# Altium footprint library laboE_altium.PcbLib: 676 footprints (part 24 of 43)
Each footprint in its own frame and in the unit in brackets; x right, y up, seen from the top. Pads: shape width x height; smd on the part's side, far side on the other; paste and mask are expansions set on the pad; w line width, h text height; cw(c..) or ccw(c..) is an arc to the next point about the centre after c.
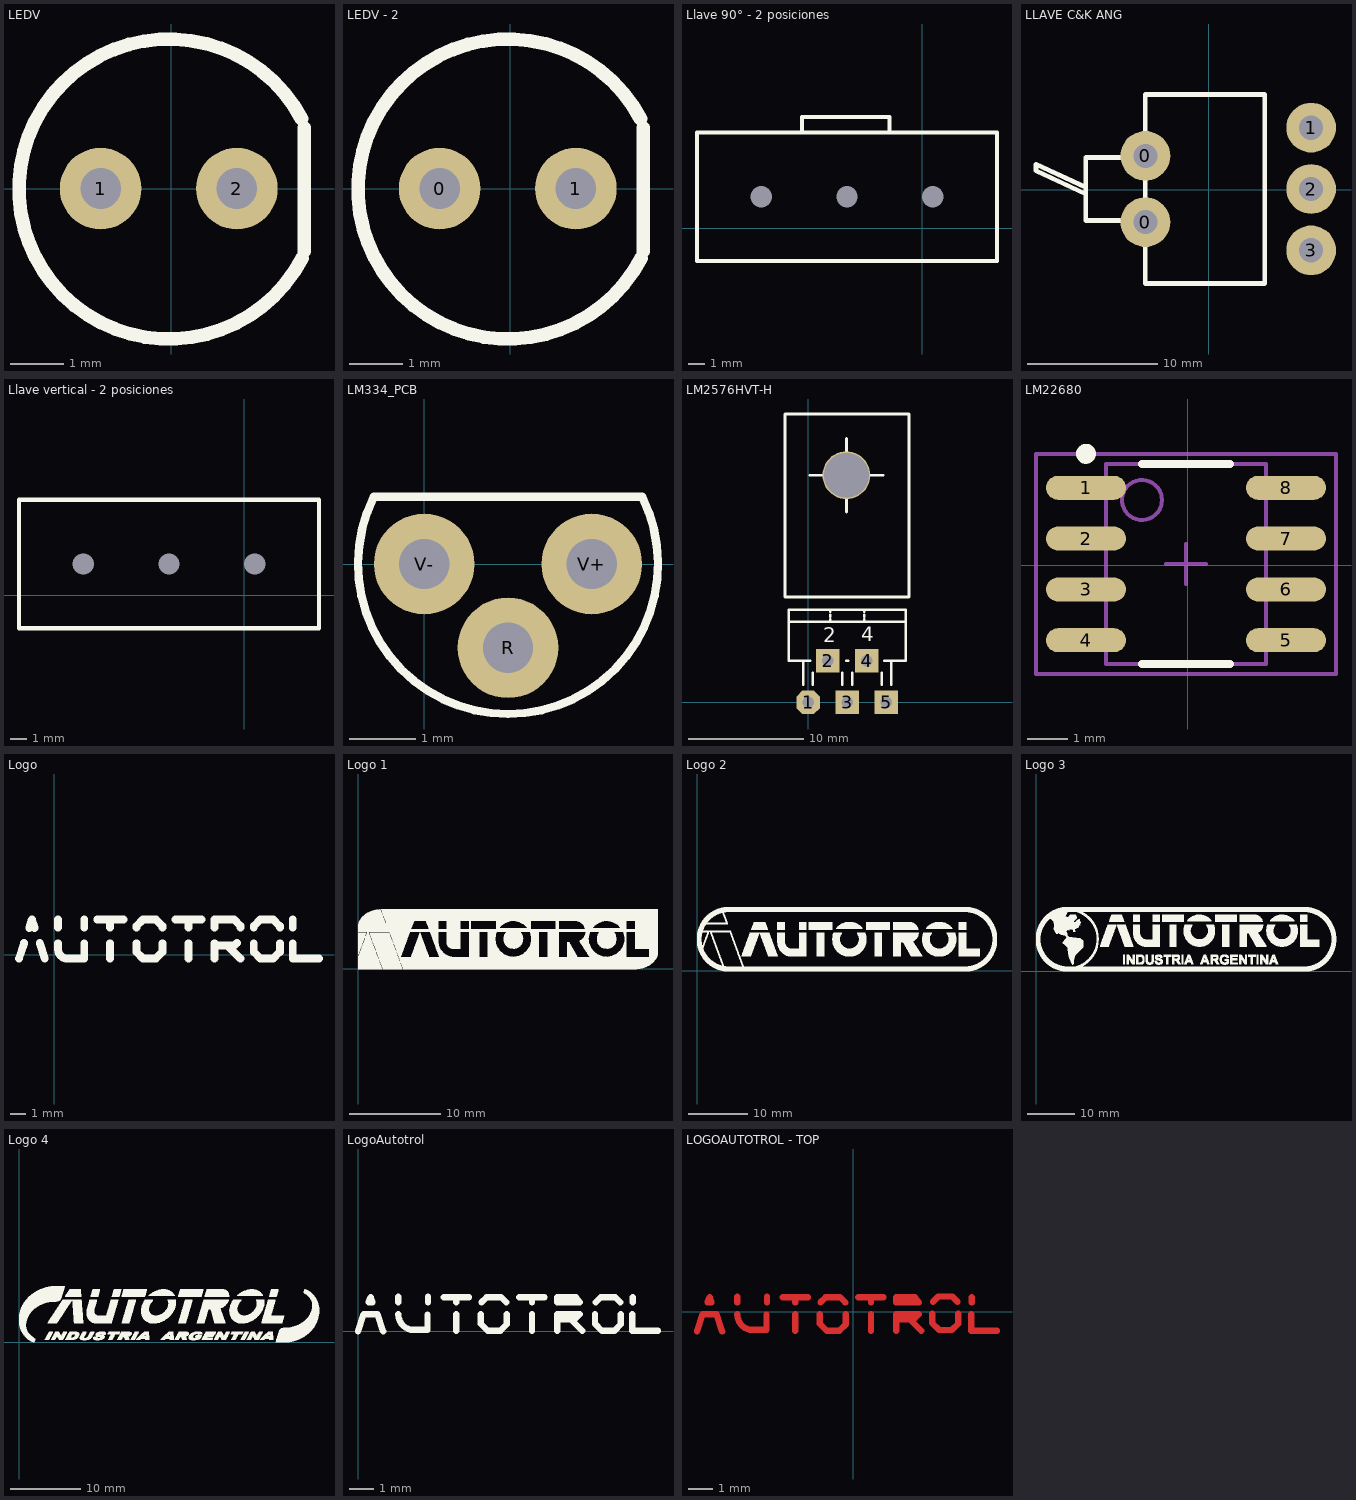
[diagram p23: the footprints below, top view; thin cyan lines are the x and y axes]

## LEDV [mil]
pads (2):
  round 60 hole 30: 1(-52,0) 2(48,0)
Top Overlay:
  lines w10: 95.55,51.35 ccw(c-1.81,-0.26) 95.86,-51.27 ; 97.67,-45.96 97.67,44.8
3D body: height 157.48, standoff 78.74, extent -113,-112 94.61,109
3D body: height 236.22, standoff 39.37, extent -102.34,-100.41 94.42,96.4
3D body: height 78.74, standoff 0, extent -75.62,-23.62 -28.37,23.63
3D body: height 78.74, standoff 0, extent 24.88,-24.12 72.12,23.12

## LEDV - 2 [mil]
pads (2):
  round 60 hole 30: 0(-52,0) 1(48,0)
Top Overlay:
  lines w10: 95.55,51.35 ccw(c-1.81,-0.26) 95.86,-51.27 ; 97.67,-45.96 97.67,44.8
3D body: height 157.48, standoff 78.74, extent -113,-112 94.61,109
3D body: height 236.22, standoff 39.37, extent -102.34,-100.41 94.42,96.4
3D body: height 78.74, standoff 0, extent -75.62,-23.62 -28.37,23.63
3D body: height 78.74, standoff 0, extent 24.88,-24.12 72.12,23.12

## Llave 90° - 2 posiciones [mil]
pads (3):
  oct 0x0 / inner round 0 / far side oct 110x110 hole 50: 1(-376,73)
  round 0 / inner round 0 / far side round 110 hole 50: 2(-176,73) 3(24,73)
Top Overlay:
  lines w10: -281,223 -281,259 -77,259 -77,223 ; -526,-77 -526,223 174,223 174,-77 -526,-77
3D body: height 472.44, standoff 0, extent -523,-78 174,224
3D body: height 354.33, standoff 118.11, extent -495,257 134,382
3D body: height 314.96, standoff 157.48, extent -282,224 -76,257

## LLAVE C&K ANG [mil]
pads (5):
  round 150 hole 73: 0(-190.78,-97.98) 0(-190.78,102.02) 1(309.22,187.02) 2(309.22,2.02) 3(309.22,-182.98)
Top Overlay:
  lines w14: -370.78,-12.98 -520.78,57.02 -520.78,77.02 -370.78,7.02 ; -190.78,-92.98 -370.78,-92.98 -370.78,97.02 -190.78,97.02 ; -190.78,-282.98 -190.78,287.02 169.22,287.02 169.22,-282.98 -190.78,-282.98
3D body: height 39.37, standoff -39.37, extent -210.42,82.49 -171.13,121.71
3D body: height 39.37, standoff -39.37, extent -210.42,-117.51 -171.13,-78.29
3D body: height 139.61, standoff 100.39, extent 151.74,167.37 309.22,206.66
3D body: height 139.61, standoff 100.39, extent 151.74,-17.63 309.22,21.66
3D body: height 139.61, standoff 100.39, extent 151.74,-202.63 309.22,-163.34
3D body: height 137.8, standoff -39.37, extent 289.58,167.49 328.87,206.71
3D body: height 137.8, standoff -39.37, extent 289.57,-17.51 328.86,21.71
3D body: height 137.8, standoff -39.37, extent 289.58,-202.51 328.87,-163.29
3D body: height 166.95, standoff 72.83, extent -578.89,-105.58 -176.68,117.69
3D body: height 275.59, standoff 7.87, extent -197.67,-193.34 -189.8,196.43
3D body: height 19.68, standoff 0, extent -197.67,-193.34 129.1,196.43
3D body: height 279.53, standoff 267.72, extent -197.67,-193.34 129.1,196.43
3D body: height 239.21, standoff 0, extent -372.87,-119.52 -18.54,120.17
3D body: height 275.59, standoff 7.87, extent -185.86,-283.89 168.47,288.94

## Llave vertical - 2 posiciones [mil]
pads (3):
  oct 0x0 / inner round 0 / far side oct 110x110 hole 50: 1(-376,73)
  round 0 / inner round 0 / far side round 110 hole 50: 2(-176,73) 3(24,73)
Top Overlay:
  lines w10: -526,-77 174,-77 174,223 -526,223 -526,-77
3D body: height 1176.95, standoff 642.36, extent -249.41,-5.58 73.04,151.59
3D body: height 787.4, standoff 393.7, extent -324.42,-76.3 -26.39,222.32
3D body: height 472.44, standoff 0, extent -523,-78 174,224

## LM334_PCB [mil]
pads (3):
  round 60 / inner round 0 / far side round 60 hole 30 paste+0: R(50,-50) V+(100,0) V-(0,0)
Top Overlay:
  lines w5: -30,40 ccw(c50,0) 130,40 -30,40

## LM2576HVT-H [mil]
pads (6):
  oct 80x80 hole 40: 1(0,0)
  rect 80x80 hole 40: 2(66.67,141.67) 3(133.33,0) 4(200,141.67) 5(266.67,0)
  round 163 hole 153: ""(130.33,775.83)
Top Overlay:
  lines w7.87: -66.67,275 333.33,275 ; -16.67,59.05 -16.67,141.67 ; 7.87,141.67 -66.67,141.67 -66.67,316.67 333.33,316.67 333.33,141.67 258.79,141.67 ; 15.75,59.05 15.75,101.5 ; 75,275 75,283.33 ; 75,291.67 75,300 ; 75,308.33 75,316.67 ; 116.67,59.05 116.67,101.5 ; 129.4,141.67 137.27,141.67 ; 150,59.05 150,101.5 ; 191.67,275 191.67,283.33 ; 191.67,291.67 191.67,300 ; 191.67,308.33 191.67,316.67 ; 251.21,59.05 251.21,101.5 ; 283.33,59.05 283.33,141.67
  lines w10: 5.33,775.83 55.33,775.83 ; 130.33,650.83 130.33,700.83 ; 130.33,850.83 130.33,900.83 ; 205.33,775.83 255.33,775.83 ; -80,360 345,360 345,985 -80,985 -80,360
  text "2" at 51.22,205.36 h50
  text "4" at 180.98,208.71 h50

## LM22680 [mm]
pads (8):
  oval 2x0.6 smd: 1(-2.546,1.935) 2(-2.546,0.665) 3(-2.546,-0.605) 4(-2.546,-1.875) 5(2.454,-1.875) 6(2.454,-0.605) 7(2.454,0.665) 8(2.454,1.935)
Top Overlay:
  circle w0.25: c-2.546,2.785 r0.125
  lines w0.2: -1.146,-2.47 1.054,-2.47 ; -1.146,2.53 1.054,2.53
Mechanical 13:
  circle w0.1: c-1.146,1.63 r0.5
  lines w0.1: -2.046,-2.47 -2.046,2.53 1.954,2.53 1.954,-2.47 -2.046,-2.47
Mechanical 15:
  lines w0.1: -0.546,0.03 0.454,0.03 ; -0.046,-0.47 -0.046,0.53 ; -3.796,-2.72 -3.796,2.78 3.704,2.78 3.704,-2.72 -3.796,-2.72
3D body: height 1.68, standoff 0.03, extent -2.046,-2.47 1.954,2.53

## Logo [mm]
Top Overlay:
  lines w0.508: -2.29,-0.25 -1.96,0.766 ; -1.63,1.731 -1.452,2.29 -1.274,1.731 ; -0.944,0.766 -0.614,-0.25 ; 0.25,0.334 0.25,0.741 ; 0.25,1.757 0.25,2.29 ; 0.259,0.359 ccw(c0.834,0.326) 0.834,-0.25 1.952,-0.25 1.952,0.741 ; 1.952,1.757 1.952,2.29 ; 2.79,2.29 4.492,2.29 ; 3.628,-0.25 3.628,0.741 ; 3.628,1.757 3.628,2.29 ; 5.33,0.182 5.762,-0.25 ; 5.33,0.207 5.33,0.741 ; 5.33,1.757 5.33,1.833 ; 5.33,1.858 5.762,2.29 6.575,2.29 ; 5.787,-0.25 6.6,-0.25 7.032,0.182 ; 6.6,2.29 7.032,1.858 ; 7.032,0.207 7.032,0.741 ; 7.032,1.757 7.032,1.833 ; 7.87,2.29 9.572,2.29 ; 8.708,-0.25 8.708,0.741 ; 8.708,1.757 8.708,2.29 ; 10.41,-0.25 10.41,0.741 ; 10.41,0.588 11.68,0.588 11.858,0.766 ; 10.41,1.757 10.41,2.29 11.68,2.29 12.086,1.884 12.086,1.757 ; 11.274,0.563 12.086,-0.25 ; 12.95,0.182 13.382,-0.25 ; 12.95,0.207 12.95,0.741 ; 12.95,1.757 12.95,1.833 ; 12.95,1.858 13.382,2.29 14.195,2.29 ; 13.407,-0.25 14.22,-0.25 14.652,0.182 ; 14.22,2.29 14.652,1.858 ; 14.652,0.207 14.652,0.741 ; 14.652,1.757 14.652,1.833 ; 15.49,0.741 15.49,-0.25 17.192,-0.25 ; 15.49,1.757 15.49,2.29

## Logo 1 [mm]
Top Overlay:
  drawing of 2301 lines, arcs and shapes, not listed

## Logo 2 [mm]
Top Overlay:
  drawing of 3637 lines, arcs and shapes, not listed

## Logo 3 [mm]
Top Overlay:
  drawing of 6632 lines, arcs and shapes, not listed

## Logo 4 [mm]
Top Overlay:
  drawing of 3600 lines, arcs and shapes, not listed

## LOGO_AUTO [mm]
height 1
Top Overlay:
  lines w0.508: 0,0 0.33,1.016 ; 0.66,1.981 0.838,2.54 1.016,1.981 ; 1.346,1.016 1.676,0 ; 2.54,0.584 2.54,0.991 ; 2.54,2.007 2.54,2.54 ; 2.549,0.609 ccw(c3.124,0.576) 3.124,0 4.242,0 4.242,0.991 ; 4.242,2.007 4.242,2.54 ; 5.08,2.54 6.782,2.54 ; 5.918,0 5.918,0.991 ; 5.918,2.007 5.918,2.54 ; 7.62,0.432 8.052,0 ; 7.62,0.457 7.62,0.991 ; 7.62,2.007 7.62,2.083 ; 7.62,2.108 8.052,2.54 8.865,2.54 ; 8.077,0 8.89,0 9.322,0.432 ; 8.89,2.54 9.322,2.108 ; 9.322,0.457 9.322,0.991 ; 9.322,2.007 9.322,2.083 ; 10.16,2.54 11.862,2.54 ; 10.998,0 10.998,0.991 ; 10.998,2.007 10.998,2.54 ; 12.7,0 12.7,0.991 ; 12.7,0.838 13.97,0.838 14.148,1.016 ; 12.7,2.007 12.7,2.54 13.97,2.54 14.376,2.134 14.376,2.007 ; 13.564,0.813 14.376,0 ; 15.24,0.432 15.672,0 ; 15.24,0.457 15.24,0.991 ; 15.24,2.007 15.24,2.083 ; 15.24,2.108 15.672,2.54 16.485,2.54 ; 15.697,0 16.51,0 16.942,0.432 ; 16.51,2.54 16.942,2.108 ; 16.942,0.457 16.942,0.991 ; 16.942,2.007 16.942,2.083 ; 17.78,0.991 17.78,0 19.482,0 ; 17.78,2.007 17.78,2.54 ; 2183.976,2674.027 2184.306,2675.043 ; 2184.636,2676.008 2184.814,2676.567 2184.992,2676.008 ; 2185.322,2675.043 2185.652,2674.027 ; 2186.516,2674.611 2186.516,2675.018 ; 2186.516,2676.034 2186.516,2676.567 ; 2186.525,2674.636 ccw(c2187.1,2674.603) 2187.1,2674.027 2188.218,2674.027 2188.218,2675.018 ; 2188.218,2676.034 2188.218,2676.567 ; 2189.056,2676.567 2190.758,2676.567 ; 2189.894,2674.027 2189.894,2675.018 ; 2189.894,2676.034 2189.894,2676.567 ; 2191.596,2674.459 2192.028,2674.027 ; 2191.596,2674.484 2191.596,2675.018 ; 2191.596,2676.034 2191.596,2676.11 ; 2191.596,2676.135 2192.028,2676.567 2192.841,2676.567 ; 2192.053,2674.027 2192.866,2674.027 2193.298,2674.459 ; 2192.866,2676.567 2193.298,2676.135 ; 2193.298,2674.484 2193.298,2675.018 ; 2193.298,2676.034 2193.298,2676.11 ; 2194.136,2676.567 2195.838,2676.567 ; 2194.974,2674.027 2194.974,2675.018 ; 2194.974,2676.034 2194.974,2676.567 ; 2196.676,2674.027 2196.676,2675.018 ; 2196.676,2674.865 2197.946,2674.865 2198.124,2675.043 ; 2196.676,2676.034 2196.676,2676.567 2197.946,2676.567 2198.352,2676.161 2198.352,2676.034 ; 2197.54,2674.84 2198.352,2674.027 ; 2199.216,2674.459 2199.648,2674.027 ; 2199.216,2674.484 2199.216,2675.018 ; 2199.216,2676.034 2199.216,2676.11 ; 2199.216,2676.135 2199.648,2676.567 2200.461,2676.567 ; 2199.673,2674.027 2200.486,2674.027 2200.918,2674.459 ; 2200.486,2676.567 2200.918,2676.135 ; 2200.918,2674.484 2200.918,2675.018 ; 2200.918,2676.034 2200.918,2676.11 ; 2201.756,2675.018 2201.756,2674.027 2203.458,2674.027 ; 2201.756,2676.034 2201.756,2676.567 ; 2321.007,1659.943 2321.337,1660.959 ; 2321.667,1661.924 2321.845,1662.483 2322.023,1661.924 ; 2322.353,1660.959 2322.683,1659.943 ; 2323.547,1660.527 2323.547,1660.934 ; 2323.547,1661.95 2323.547,1662.483 ; 2323.556,1660.552 ccw(c2324.131,1660.519) 2324.131,1659.943 2325.249,1659.943 2325.249,1660.934 ; 2325.249,1661.95 2325.249,1662.483 ; 2326.087,1662.483 2327.789,1662.483 ; 2326.925,1659.943 2326.925,1660.934 ; 2326.925,1661.95 2326.925,1662.483 ; 2328.627,1660.375 2329.059,1659.943 ; 2328.627,1660.4 2328.627,1660.934 ; 2328.627,1661.95 2328.627,1662.026 ; 2328.627,1662.051 2329.059,1662.483 2329.872,1662.483 ; 2329.084,1659.943 2329.897,1659.943 2330.329,1660.375 ; 2329.897,1662.483 2330.329,1662.051 ; 2330.329,1660.4 2330.329,1660.934 ; 2330.329,1661.95 2330.329,1662.026 ; 2331.167,1662.483 2332.869,1662.483 ; 2332.005,1659.943 2332.005,1660.934 ; 2332.005,1661.95 2332.005,1662.483 ; 2333.707,1659.943 2333.707,1660.934 ; 2333.707,1660.781 2334.977,1660.781 2335.155,1660.959 ; 2333.707,1661.95 2333.707,1662.483 2334.977,1662.483 2335.383,1662.077 2335.383,1661.95 ; 2334.571,1660.756 2335.383,1659.943 ; 2336.247,1660.375 2336.679,1659.943 ; 2336.247,1660.4 2336.247,1660.934 ; 2336.247,1661.95 2336.247,1662.026 ; 2336.247,1662.051 2336.679,1662.483 2337.492,1662.483 ; 2336.704,1659.943 2337.517,1659.943 2337.949,1660.375 ; 2337.517,1662.483 2337.949,1662.051 ; 2337.949,1660.4 2337.949,1660.934 ; 2337.949,1661.95 2337.949,1662.026 ; 2338.787,1660.934 2338.787,1659.943 2340.489,1659.943 ; 2338.787,1661.95 2338.787,1662.483

## LogoAutotrol [mm]
Top Overlay:
  lines w0.254: 0,0 0.229,0.686 0.787,0.686 1.016,0 ; 1.625,0.686 ccw(c2.261,0.686) 2.112,0.068 2.802,0.068 2.802,0.677 ; 1.626,1.168 1.626,1.397 ; 2.819,1.168 2.819,1.397 ; 3.454,1.372 3.962,1.372 ; 3.962,0.025 3.962,0.686 ; 3.962,1.168 3.962,1.372 ; 4.47,1.372 3.962,1.372 ; 4.953,0.686 4.953,0.305 5.232,0.025 5.74,0.025 5.994,0.279 5.994,0.686 ; 4.978,1.168 5.182,1.372 5.766,1.372 5.969,1.168 ; 6.502,1.372 7.01,1.372 ; 7.01,0.025 7.01,0.686 ; 7.01,1.168 7.01,1.372 ; 7.518,1.372 7.01,1.372 ; 8.026,0.025 8.026,0.686 8.941,0.686 8.661,0.406 ; 8.026,0.483 8.585,0.483 8.661,0.406 ; 9.042,0.025 8.661,0.406 ; 9.55,0.686 9.55,0.305 9.83,0.025 10.338,0.025 10.592,0.279 10.592,0.686 ; 9.576,1.168 9.779,1.372 10.363,1.372 10.566,1.168 ; 11.049,0.686 11.049,0.025 12.09,0.025 ; 11.074,1.168 11.074,1.372 ; 0.432,1.168 0.584,1.168 ; 0.432,1.168 0.508,1.372 0.584,1.168 ; 0.432,1.168 0.584,1.168 ; 8.026,1.168 8.026,1.372 8.788,1.372 8.941,1.168 8.026,1.168

## LOGOAUTOTROL - TOP [mm]
Top Layer:
  lines w0.254: -6.3,-0.8 -6.071,-0.114 -5.513,-0.114 -5.284,-0.8 ; -4.675,-0.114 ccw(c-4.039,-0.114) -4.188,-0.732 -3.498,-0.732 -3.498,-0.123 ; -4.674,0.368 -4.674,0.597 ; -3.481,0.368 -3.481,0.597 ; -2.846,0.572 -2.338,0.572 ; -2.338,-0.775 -2.338,-0.114 ; -2.338,0.368 -2.338,0.572 ; -1.83,0.572 -2.338,0.572 ; -1.347,-0.114 -1.347,-0.495 -1.068,-0.775 -0.56,-0.775 -0.306,-0.521 -0.306,-0.114 ; -1.322,0.368 -1.118,0.572 -0.534,0.572 -0.331,0.368 ; 0.202,0.572 0.71,0.572 ; 0.71,-0.775 0.71,-0.114 ; 0.71,0.368 0.71,0.572 ; 1.218,0.572 0.71,0.572 ; 1.726,-0.775 1.726,-0.114 2.641,-0.114 2.361,-0.394 ; 1.726,-0.317 2.285,-0.317 2.361,-0.394 ; 2.742,-0.775 2.361,-0.394 ; 3.184,-0.083 3.184,-0.464 3.463,-0.743 3.971,-0.743 4.225,-0.489 4.225,-0.083 ; 3.209,0.4 3.413,0.603 3.997,0.603 4.2,0.4 ; 4.749,-0.114 4.749,-0.775 5.79,-0.775 ; 4.774,0.368 4.774,0.572 ; -5.868,0.368 -5.716,0.368 ; -5.868,0.368 -5.716,0.368 ; -5.868,0.368 -5.792,0.572 -5.716,0.368 ; 1.726,0.368 2.641,0.368 2.488,0.572 1.726,0.572 1.726,0.368